# Altium footprint library Clema_Diode.PcbLib: 8 footprints
Each footprint in its own frame and in the unit in brackets; x right, y up, seen from the top. Pads: shape width x height; smd on the part's side, far side on the other; paste and mask are expansions set on the pad; w line width, h text height; cw(c..) or ccw(c..) is an arc to the next point about the centre after c.
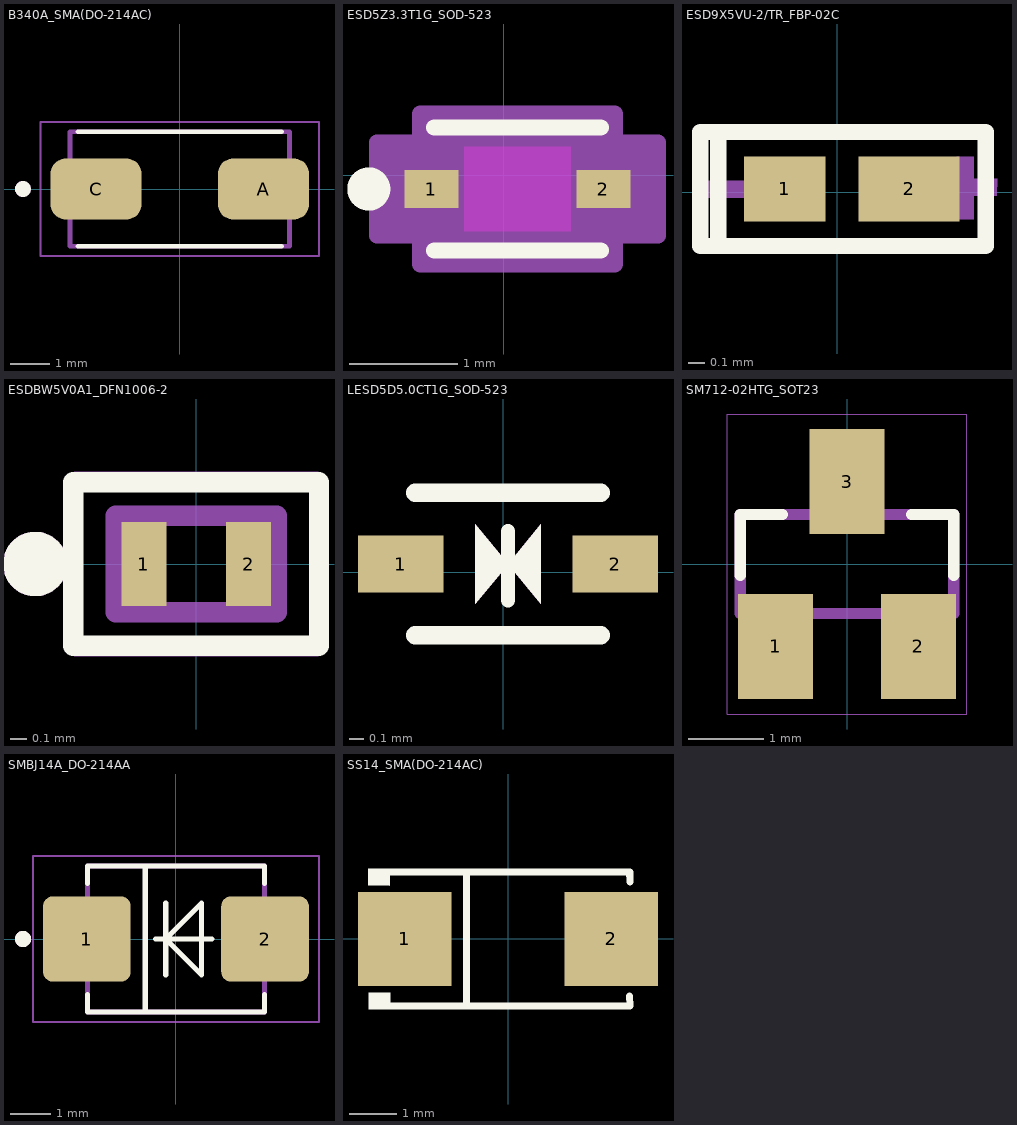
[diagram p0: the footprints below, top view; thin cyan lines are the x and y axes]

## B340A_SMA(DO-214AC) [mm]
pads (2):
  rrect50% 2.33x1.55 smd: A(2.135,0) C(-2.135,0)
Top Overlay:
  circle w0.2: c-4,0 r0.1
  lines w0.127: -2.6,-1.46 2.6,-1.46 ; -2.6,1.46 2.6,1.46
Mechanical 13:
  circle w0.2: c-4,0 r0.1
  lines w0.127: -2.8,-1.46 2.8,-1.46 2.8,1.46 -2.8,1.46 -2.8,-1.46
Mechanical 15:
  lines w0.05: -3.55,-1.71 3.55,-1.71 3.55,1.71 -3.55,1.71 -3.55,-1.71
3D body "step_temp.STEP": height 2.4, standoff 0, extent -2.598,-1.302 2.598,1.302

## ESD5Z3.3T1G_SOD-523 [mil]
pads (2):
  rect 19.87x14 smd paste+0 mask+0: 1(-26.44,-5) 2(36.44,-5)
Top Layer keep-out:
  region: -14.5,-20.5 -14.5,10.5 24.5,10.5 24.5,-20.5
Top Overlay:
  circle w7.87: c-49.37,-5 r3.94
  lines w6: -25.5,-27.5 35.5,-27.5 ; -25.5,17.5 35.5,17.5
Keep-Out Layer:
  region: -14.5,-20.5 -14.5,10.5 24.5,10.5 24.5,-20.5
Mechanical 13:
  lines w1: -20.5,-13.75 -11.75,-22.5 ; -20.5,3.75 -11.75,12.5 ; -28.5,-12 -20.5,-12 -20.5,2 -28.5,2 -28.5,-12 ; -20.5,-22.5 -20.5,12.5 30.5,12.5 30.5,-22.5 -20.5,-22.5 ; 30.5,-12 38.5,-12 38.5,2 30.5,2 30.5,-12
  text "*" at -23,-30 h50
Mechanical 15:
  region: -30.5,-22 -46.37,-22 -46.37,12 -30.5,12 -30.5,22.5 40.5,22.5 40.5,12 56.37,12 56.37,-22 40.5,-22 40.5,-32.5 -30.5,-32.5
  lines w6: -46.37,-22 -30.5,-22 -30.5,-32.5 40.5,-32.5 40.5,-22 56.37,-22 56.37,12 40.5,12 40.5,22.5 -30.5,22.5 -30.5,12 -46.37,12 -46.37,-22
3D body "SOD-523_0P9X1P3_ONS.step": height 18.27, standoff 0, extent -28.5,-22.48 38.5,12.48

## ESD9X5VU-2/TR_FBP-02C [mm]
pads (2):
  rect 0.5x0.4 smd paste+0 mask+0.051: 1(-0.32,0.019)
  rect 0.62x0.4 smd paste+0 mask+0.051: 2(0.442,0.019)
Top Overlay:
  lines w0.1: -0.728,-0.331 -0.728,0.369 ; -0.839,-0.331 0.911,-0.331 0.911,0.369 -0.839,0.369 -0.839,-0.331
Mechanical 15:
  region: -0.859,0.069 -0.476,0.069 -0.477,-0.035 -0.859,-0.035
  region: 0.597,0.08 0.98,0.08 0.98,-0.023 0.597,-0.023
  region: 0.735,-0.165 0.735,0.218 0.838,0.217 0.838,-0.165

## ESDBW5V0A1_DFN1006-2 [mm]
height 0.4
pads (2):
  rect 0.28x0.52 smd: 1(-0.325,0) 2(0.325,0)
Top Overlay:
  circle w0.2: c-1,0 r0.1
  lines w0.127: -0.762,-0.508 0.762,-0.508 0.762,0.508 -0.762,0.508 -0.762,-0.508
Mechanical 13:
  circle w0.2: c-1,0 r0.1
  lines w0.127: -0.5,-0.3 0.5,-0.3 0.5,0.3 -0.5,0.3 -0.5,-0.3
Mechanical 15:
  lines w0.05: -0.75,-0.55 0.75,-0.55 0.75,0.55 -0.75,0.55 -0.75,-0.55
3D body "step_temp.STEP": height 0.4, standoff 0, extent -0.506,-0.312 0.506,0.312

## LESD5D5.0CT1G_SOD-523 [mm]
pads (2):
  rect 0.6x0.4 smd paste+0 mask+0.051: 1(-0.716,0.057) 2(0.784,0.057)
Top Overlay:
  region: 0.034,0.057 0.263,0.336 0.263,-0.222
  region: 0.034,0.057 -0.195,-0.222 -0.195,0.336
  lines w0.1: 0.034,-0.197 0.034,0.286
  lines w0.13: -0.616,-0.443 0.684,-0.443 ; -0.616,0.557 0.684,0.557
Mechanical 15:
  region: -0.195,0.336 -0.195,-0.222 0.034,0.057
  region: 0.263,0.336 0.263,-0.222 0.034,0.057
3D body "LESD5D5.0CT1G--3DModel-STEP-510211.STEP": height 0.7, standoff 0, extent -0.749,-0.349 0.851,0.451

## SM712-02HTG_SOT23 [mm]
pads (3):
  rect 1x1.4 smd: 1(-0.95,-1.1) 2(0.95,-1.1) 3(0,1.1)
Top Overlay:
  lines w0.152: -1.422,-0.152 -1.422,0.66 -0.864,0.66 ; 0.864,0.66 1.422,0.66 1.422,-0.152
Mechanical 13:
  region: 0.229,0.711 -0.229,0.711 -0.229,1.295 0.229,1.295
  region: 1.168,-1.295 0.711,-1.295 0.711,-0.711 1.168,-0.711
  region: -0.711,-1.295 -1.168,-1.295 -1.168,-0.711 -0.711,-0.711
  lines w0.152: -1.422,-0.66 1.422,-0.66 1.422,0.66 -1.422,0.66 -1.422,-0.66
Mechanical 15:
  lines w0: -1.6,-2 1.6,-2 1.6,2 -1.6,2 -1.6,-2
3D body "step_temp.STEP": height 1.12, standoff 0, extent -1.46,-1.185 1.46,1.185

## SMBJ14A_DO-214AA [mm]
height 2.61
pads (2):
  rrect23% 2.18x2.12 smd paste+0 mask+0.102: 1(-2.215,0) 2(2.215,0)
Top Overlay:
  circle w0.2: c-3.8,0 r0.1
  lines w0.127: -2.203,-1.38 -2.203,-1.81 2.203,-1.81 2.203,-1.38 ; -2.203,1.38 -2.203,1.81 2.203,1.81 2.203,1.38 ; -0.762,-1.778 -0.762,1.778 ; -0.508,0 0.889,0 ; -0.254,-0.889 -0.254,0.889 ; -0.254,0 0.635,0.889 0.635,-0.889 -0.254,0
Mechanical 13:
  circle w0.2: c-3.8,0 r0.1
  lines w0.127: -2.203,-1.81 2.203,-1.81 2.203,1.81 -2.203,1.81 -2.203,-1.81
Mechanical 15:
  lines w0.05: -3.555,-2.06 -3.555,2.06 3.555,2.06 3.555,-2.06 -3.555,-2.06

## SS14_SMA(DO-214AC) [mm]
pads (2):
  rect 2x2 smd paste+0 mask+0.051: 1(-2.2,0) 2(2.2,0)
Top Overlay:
  region: -2.52,1.502 -2.521,1.141 -2.98,1.146 -2.977,1.502
  region: -2.512,-1.143 -2.513,-1.503 -2.973,-1.498 -2.969,-1.143
  lines w0.152: -2.596,-1.426 2.596,-1.426 ; -2.596,1.426 2.596,1.426 2.602,1.22 ; -0.884,-1.426 -0.884,1.426 ; 2.595,-1.219 2.6,-1.415
Mechanical 15:
  region: -2.317,-0.101 -2.317,0.101 -1.507,0.101 -1.507,-0.101
  region: 2.29,-0.09 2.29,0.112 1.48,0.112 1.48,-0.09
  region: 2.014,-0.675 2.014,0.675 1.811,0.675 1.811,-0.675
3D body "ss14_R.stp": height 2.09, standoff -0.01, extent -2.35,-1.254 2.35,1.346